# Altium integrated library BZX84C12_RF.IntLib: 1 symbol
Pins are listed as number, name and electrical type; pins without a type are passive.

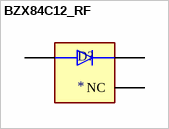
[diagram p0: symbol BZX84C12_RF]

## BZX84C12_RF
designator D?
MF: {'manufacturer': u'Taiwan Semiconductor'}; MP: BZX84C12 RFG; Package: None; Price: None; Value: *; Availability: Unavailable
footprint SOT95P237X112-3N
pins: 1 A, 2 NC, 3 K